# Altium footprint library MB10S.PcbLib: 4 footprints
Each footprint in its own frame and in the unit in brackets; x right, y up, seen from the top. Pads: shape width x height; smd on the part's side, far side on the other; paste and mask are expansions set on the pad; w line width, h text height; cw(c..) or ccw(c..) is an arc to the next point about the centre after c.
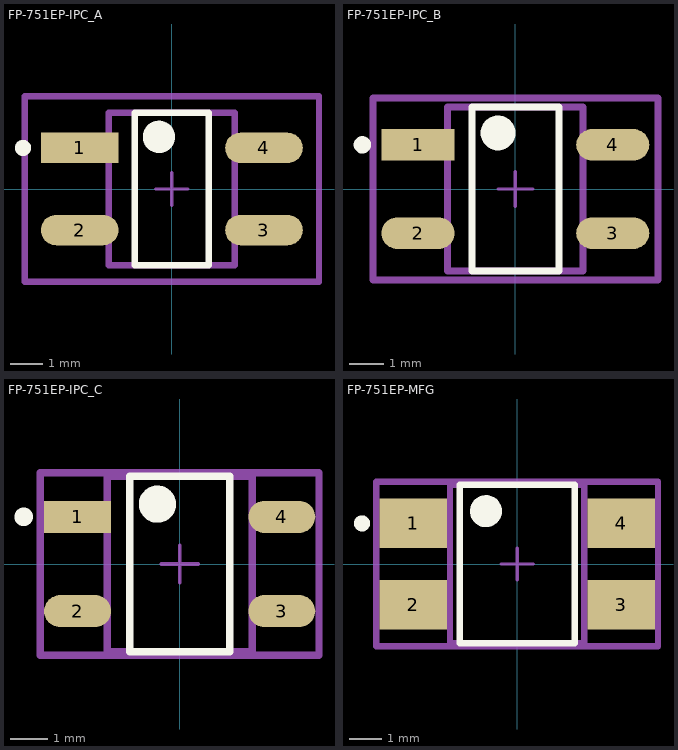
[diagram p0: the footprints below, top view; thin cyan lines are the x and y axes]

## FP-751EP-IPC_A [mil]
pads (4):
  rect 94.62x37.25 smd paste+0 mask+0: 1(-112.22,50)
  rrect100% 94.62x37.25 smd paste+0 mask+0: 2(-112.22,-50) 3(112.22,-50) 4(112.22,50)
Top Overlay:
  circle w19.68: c-15.7,63.48 r9.84
  circle w9.84: c-181.18,50 r4.92
  lines w7.87: -45.23,-93.01 45.23,-93.01 45.23,93.01 -45.23,93.01 -45.23,-93.01
Top Assembly:
  lines w7.87: -179.22,-112.7 179.22,-112.7 179.22,112.7 -179.22,112.7 -179.22,-112.7
  text ".Designator" at 0,7.43 h39.37
Top 3D Body:
  lines w7.87: -76.77,-93.01 76.77,-93.01 76.77,93.01 -76.77,93.01 -76.77,-93.01
Top Courtyard:
  lines w7.87: -179.22,-112.7 179.22,-112.7 179.22,112.7 -179.22,112.7 -179.22,-112.7
Top Component Center:
  lines w3.94: -19.68,0 19.68,0 ; 0,-19.68 0,19.68
3D body "Diode_ON_Semiconductor_MB4S_eec.STEP": height 10, standoff 0, extent -179.22,-112.7 179.22,112.7

## FP-751EP-IPC_B [mil]
pads (4):
  rect 82.81x35.67 smd paste+0 mask+0: 1(-110.25,50)
  rrect100% 82.81x35.67 smd paste+0 mask+0: 2(-110.25,-50) 3(110.25,-50) 4(110.25,50)
Top Overlay:
  circle w19.68: c-19.64,63.48 r9.84
  circle w9.84: c-173.31,50 r4.92
  lines w7.87: -49.17,-93.01 49.17,-93.01 49.17,93.01 -49.17,93.01 -49.17,-93.01
Top Assembly:
  lines w7.87: -161.5,-102.85 161.5,-102.85 161.5,102.85 -161.5,102.85 -161.5,-102.85
  text ".Designator" at 0,7.43 h39.37
Top 3D Body:
  lines w7.87: -76.77,-93.01 76.77,-93.01 76.77,93.01 -76.77,93.01 -76.77,-93.01
Top Courtyard:
  lines w7.87: -161.5,-102.85 161.5,-102.85 161.5,102.85 -161.5,102.85 -161.5,-102.85
Top Component Center:
  lines w3.94: -19.68,0 19.68,0 ; 0,-19.68 0,19.68
3D body "Diode_ON_Semiconductor_MB4S_eec.STEP": height 10, standoff 0, extent -161.5,-102.85 161.5,102.85

## FP-751EP-IPC_C [mil]
pads (4):
  rect 70.99x34.1 smd paste+0 mask+0: 1(-108.29,50)
  rrect100% 70.99x34.1 smd paste+0 mask+0: 2(-108.29,-50) 3(108.29,-50) 4(108.29,50)
Top Overlay:
  circle w19.68: c-23.58,63.48 r9.84
  circle w9.84: c-165.44,50 r4.92
  lines w7.87: -53.1,-93.01 53.1,-93.01 53.1,93.01 -53.1,93.01 -53.1,-93.01
Top Assembly:
  lines w7.87: -147.72,-96.95 147.72,-96.95 147.72,96.95 -147.72,96.95 -147.72,-96.95
  text ".Designator" at 0,7.43 h39.37
Top 3D Body:
  lines w7.87: -76.77,-93.01 76.77,-93.01 76.77,93.01 -76.77,93.01 -76.77,-93.01
Top Courtyard:
  lines w7.87: -147.72,-96.95 147.72,-96.95 147.72,96.95 -147.72,96.95 -147.72,-96.95
Top Component Center:
  lines w3.94: -19.68,0 19.68,0 ; 0,-19.68 0,19.68
3D body "Diode_ON_Semiconductor_MB4S_eec.STEP": height 10, standoff 0, extent -147.72,-96.95 147.72,96.95

## FP-751EP-MFG [mm]
pads (4):
  rect 2.1x1.55 smd paste+0 mask+0: 1(-3.25,1.27) 2(-3.25,-1.27) 3(3.25,-1.27) 4(3.25,1.27)
Top Overlay:
  circle w0.25: c-4.85,1.27 r0.125
  circle w0.5: c-0.975,1.65 r0.25
  lines w0.2: -1.8,-2.475 1.8,-2.475 1.8,2.475 -1.8,2.475 -1.8,-2.475
Top Assembly:
  lines w0.2: -4.4,-2.575 4.4,-2.575 4.4,2.575 -4.4,2.575 -4.4,-2.575
  text ".Designator" at 0,0.189 h1
Top 3D Body:
  lines w0.2: -2.1,-2.475 2.1,-2.475 2.1,2.475 -2.1,2.475 -2.1,-2.475
Top Courtyard:
  lines w0.2: -4.4,-2.575 4.4,-2.575 4.4,2.575 -4.4,2.575 -4.4,-2.575
Top Component Center:
  lines w0.1: -0.5,0 0.5,0 ; 0,-0.5 0,0.5
3D body "Diode_ON_Semiconductor_MB4S_eec.STEP": height 0.25, standoff 0, extent -4.4,-2.575 4.4,2.575